# Altium footprint library Amin-Library.PcbLib: 601 footprints (part 5 of 38)
Each footprint in its own frame and in the unit in brackets; x right, y up, seen from the top. Pads: shape width x height; smd on the part's side, far side on the other; paste and mask are expansions set on the pad; w line width, h text height; cw(c..) or ccw(c..) is an arc to the next point about the centre after c.
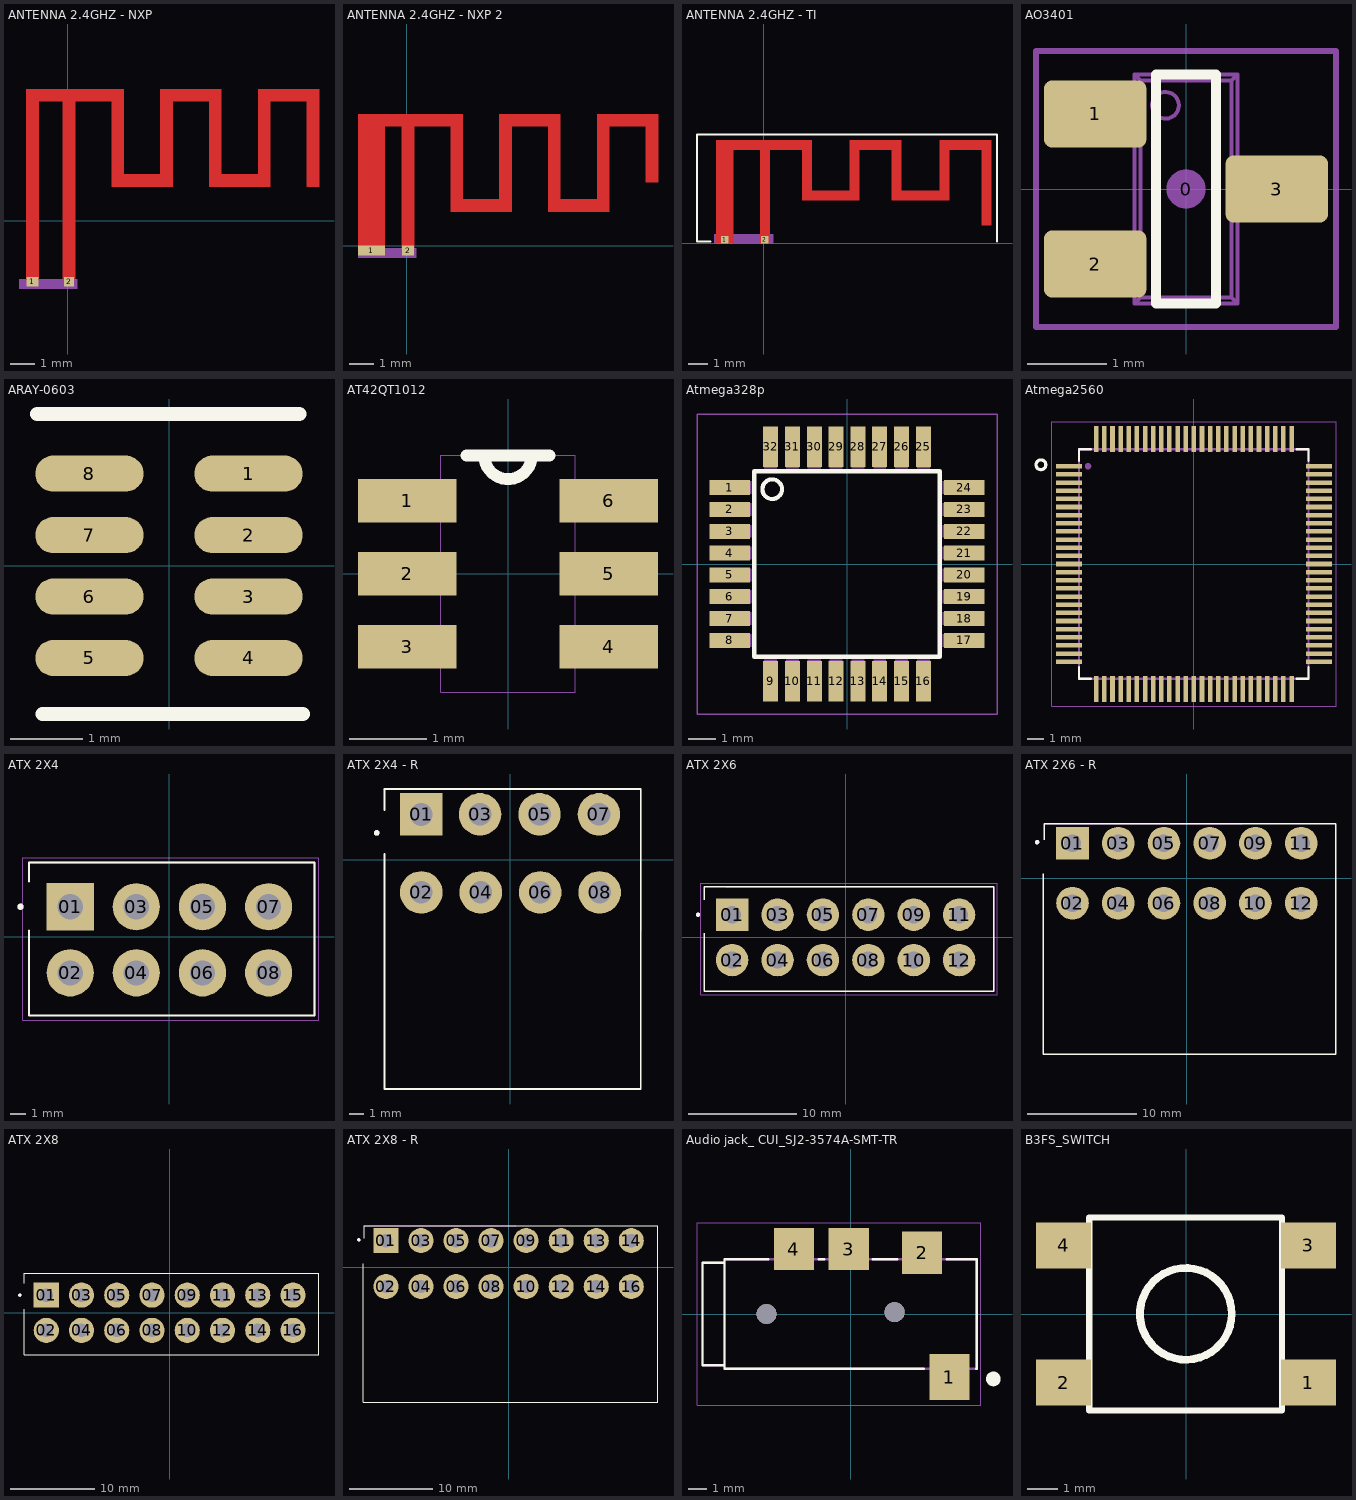
[diagram p4: the footprints below, top view; thin cyan lines are the x and y axes]

## ANTENNA 2.4GHZ - NXP [mm] "ESP32 ANTENNA"
pads (2):
  rect 0.5x0.4 smd: 1(-1.45,-2.5)
  rect 0.4x0.4 smd: 2(0.05,-2.5)
Top Layer:
  region: 0.3,-2.4 -0.2,-2.4 -0.2,4.9 -1.2,4.9 -1.2,-2.4 -1.7,-2.4 -1.7,5.4 2.3,5.4 2.3,1.9 3.8,1.9 3.8,5.4 6.3,5.4 6.3,1.9 7.8,1.9 7.8,5.4 10.3,5.4 10.3,1.4 9.8,1.4 9.8,4.9 8.3,4.9 8.3,1.4 5.8,1.4 5.8,4.9 4.3,4.9 4.3,1.4 1.8,1.4 1.8,4.9 0.3,4.9
Mechanical 3:
  rectangle: -2,-2.8 0.4,-2.4

## ANTENNA 2.4GHZ - NXP 2 [mm] "ESP32 ANTENNA"
pads (2):
  rect 1.1x0.4 smd: 1(-1.45,-0.2)
  rect 0.5x0.4 smd: 2(0.05,-0.2)
Top Layer:
  region: 0.3,-0.1 -0.2,-0.1 -0.2,4.9 -0.9,4.9 -0.9,-0.1 -2,-0.1 -2,5.4 2.3,5.4 2.3,1.9 3.8,1.9 3.8,5.4 6.3,5.4 6.3,1.9 7.8,1.9 7.8,5.4 10.3,5.4 10.3,2.6 9.8,2.6 9.8,4.9 8.3,4.9 8.3,1.4 5.8,1.4 5.8,4.9 4.3,4.9 4.3,1.4 1.8,1.4 1.8,4.9 0.3,4.9
Mechanical 3:
  rectangle: -2,-0.5 0.4,-0.1

## ANTENNA 2.4GHZ - TI [mm] "TI ANTENNA"
pads (2):
  rect 0.4x0.4 smd: 1(-2.05,0.2) 2(0.05,0.2)
Top Layer:
  region: 0.3,0 -0.2,0 -0.2,4.9 -1.6,4.9 -1.6,0 -2.5,0 -2.5,5.4 2.5,5.4 2.5,2.76 4.5,2.76 4.5,5.4 7.2,5.4 7.2,2.76 9.2,2.76 9.2,5.4 11.9,5.4 11.9,0.96 11.4,0.96 11.4,4.9 9.7,4.9 9.7,2.26 6.7,2.26 6.7,4.9 5,4.9 5,2.26 2,2.26 2,4.9 0.3,4.9
Top Overlay:
  lines w0.1: -2.8,0.1 -3.5,0.1 -3.5,5.7 -2.5,5.7 12.2,5.7 12.2,0.1
Mechanical 27:
  rectangle: -2.6,0 0.5,0.5

## AO3401 [mm] "SOT23, 3 pin"
height 1.003
pads (4):
  round 0.5 on Mech15: 0(0,0)
  rrect25% 1.3x0.85 smd: 1(-1.15,0.95) 2(-1.15,-0.95) 3(1.15,0)
Top Overlay:
  lines w0.127: -0.381,-1.45 -0.381,1.45 0.381,1.45 0.381,-1.45 -0.381,-1.45
  text "." at -2.125,0.95 h1.4
Mechanical 13:
  circle w0.05: c-0.26,1.06 r0.169
  lines w0.05: -1.19,-1.19 -1.19,-0.71 ; -1.19,0.71 -1.19,1.19 ; -1.099,-1.19 -1.099,-0.71 ; -1.099,0.71 -1.099,1.19 ; -1.074,-1.19 -1.074,-0.71 ; -1.074,0.71 -1.074,1.19 ; -0.825,-1.19 -0.825,-0.71 ; -0.825,0.71 -0.825,1.19 ; -0.65,-1.19 -1.4,-1.19 -1.4,-0.71 -0.65,-0.71 ; -0.65,0.71 -1.4,0.71 -1.4,1.19 -0.65,1.19 ; 0.65,-0.24 1.4,-0.24 1.4,0.24 0.65,0.24 ; 0.825,-0.24 0.825,0.24 ; 1.074,-0.24 1.074,0.24 ; 1.099,-0.24 1.099,0.24 ; 1.19,-0.24 1.19,0.24 ; -0.65,-1.45 0.65,-1.45 ; -0.65,-1.45 -0.65,1.45 ; -0.65,-1.45 -0.576,-1.376 ; -0.65,1.45 -0.576,1.376 ; -0.65,1.45 0.65,1.45 ; -0.576,-1.376 0.576,-1.376 ; -0.576,-1.376 -0.576,1.376 ; -0.576,1.376 0.576,1.376 ; 0.576,-1.376 0.65,-1.45 ; 0.576,-1.376 0.576,1.376 ; 0.576,1.376 0.65,1.45 ; 0.65,-1.45 0.65,1.45
Mechanical 15:
  lines w0.076: -1.9,-1.75 -1.9,1.75 1.9,1.75 1.9,-1.75 -1.9,-1.75
3D body "SOT23-3.STEP": height 1.29, standoff -0.01, extent -1.4,-1.45 1.4,1.45

## ARAY-0603 [mm]
height 1.75
pads (8):
  oval 1.5x0.5 smd: 1(1.1,1.275) 2(1.1,0.425) 3(1.1,-0.425) 4(1.1,-1.275) 5(-1.1,-1.275) 6(-1.1,-0.425) 7(-1.1,0.425) 8(-1.1,1.275)
Top Overlay:
  lines w0.2: -1.825,2.1 1.8,2.1 ; -1.75,-2.05 0.706,-2.05 1.85,-2.05

## AT42QT1012 [mil]
pads (6):
  rect 50x22 smd: 1(-51,37) 2(-51,0) 3(-51,-37) 4(51,-37) 5(51,0) 6(51,37)
Top Overlay:
  lines w6: -21,60 -12,60 ; 21,60 12,60 ; -12,60 ccw(c0,60) 12,60 ; -12,60 12,60
Mechanical 4:
  lines w0: -59,-47 -34,-47 ; -59,-47 -59,-28 ; -59,-47 -34,-47 ; -59,-47 -59,-28 ; -59,-28 -34,-28 ; -59,-28 -34,-28 ; -59,-10 -34,-10 ; -59,-10 -59,10 ; -59,-10 -34,-10 ; -59,-10 -59,10 ; -59,10 -34,10 ; -59,10 -34,10 ; -59,28 -34,28 ; -59,28 -59,47 ; -59,28 -34,28 ; -59,28 -59,47 ; -59,47 -34,47 ; -59,47 -34,47 ; -34,-60 -34,-47 ; -34,-60 34,-60 ; -34,-60 -34,-47 ; -34,-60 34,-60 ; -34,-47 -34,-28 ; -34,-47 -34,-28 ; -34,-28 -34,-10 ; -34,-28 -34,-10 ; -34,-10 -34,10 ; -34,-10 -34,10 ; -34,10 -34,28 ; -34,10 -34,28 ; -34,28 -34,47 ; -34,28 -34,47 ; -34,47 -34,60 ; -34,47 -34,60 ; -34,60 -12,60 ; -34,60 -12,60 ; -12,60 ccw(c0,60) 12,60 ; -12,60 ccw(c0,60) 12,60 ; -12,60 12,60 ; -12,60 12,60 ; 12,60 34,60 ; 12,60 34,60 ; 34,-60 34,-47 ; 34,-60 34,-47 ; 34,-47 59,-47 ; 34,-47 34,-28 ; 34,-47 59,-47 ; 34,-47 34,-28 ; 34,-28 59,-28 ; 34,-28 34,-10 ; 34,-28 59,-28 ; 34,-28 34,-10 ; 34,-10 59,-10 ; 34,-10 34,10 ; 34,-10 59,-10 ; 34,-10 34,10 ; 34,10 59,10 ; 34,10 34,28 ; 34,10 59,10 ; 34,10 34,28 ; 34,28 59,28 ; 34,28 34,47 ; 34,28 59,28 ; 34,28 34,47 ; 34,47 59,47 ; 34,47 34,60 ; 34,47 59,47 ; 34,47 34,60 ; 59,-47 59,-28 ; 59,-47 59,-28 ; 59,-10 59,10 ; 59,-10 59,10 ; 59,28 59,47 ; 59,28 59,47
3D body "User Library-SOT23-6-2.STEP": height 57.09, standoff 0, extent -55.11,-57.09 55.13,57.08

## Atmega328p [mm]
pads (32):
  rect 1.5x0.55 smd: 1(-4.3,2.8) 2(-4.3,2) 3(-4.3,1.2) 4(-4.3,0.4) 5(-4.3,-0.4) 6(-4.3,-1.2) 7(-4.3,-2) 8(-4.3,-2.8) 17(4.3,-2.8) 18(4.3,-2) 19(4.3,-1.2) 20(4.3,-0.4) 21(4.3,0.4) 22(4.3,1.2) 23(4.3,2) 24(4.3,2.8)
  rect 0.55x1.5 smd: 9(-2.8,-4.3) 10(-2,-4.3) 11(-1.2,-4.3) 12(-0.4,-4.3) 13(0.4,-4.3) 14(1.2,-4.3) 15(2,-4.3) 16(2.8,-4.3) 25(2.8,4.3) 26(2,4.3) 27(1.2,4.3) 28(0.4,4.3) 29(-0.4,4.3) 30(-1.2,4.3) 31(-2,4.3) 32(-2.8,4.3)
Top Overlay:
  circle w0.152: c-2.743,2.743 r0.359
  lines w0.152: -3.4,-3.4 3.4,-3.4 3.4,3.4 -3.4,3.4 -3.4,-3.4
Mechanical 4:
  drawing of 64 lines, arcs and shapes, not listed
Mechanical 16:
  lines w0.05: -5.5,-5.5 5.5,-5.5 5.5,5.5 -5.5,5.5 -5.5,-5.5
3D body "User Library-TQFP32-4.STEP": height 1.01, standoff -0.14, extent -4.512,-4.512 4.512,4.512

## Atmega2560 [mm]
pads (100):
  rect 1.6x0.28 smd: 1(-7.68,6) 2(-7.68,5.5) 3(-7.68,5) 4(-7.68,4.5) 5(-7.68,4) 6(-7.68,3.5) 7(-7.68,3) 8(-7.68,2.5) 9(-7.68,2) 10(-7.68,1.5) 11(-7.68,1) 12(-7.68,0.5) 13(-7.68,0) 14(-7.68,-0.5) 15(-7.68,-1) 16(-7.68,-1.5) 17(-7.68,-2) 18(-7.68,-2.5) 19(-7.68,-3) 20(-7.68,-3.5) 21(-7.68,-4) 22(-7.68,-4.5) 23(-7.68,-5) 24(-7.68,-5.5) 25(-7.68,-6) 51(7.68,-6) 52(7.68,-5.5) 53(7.68,-5) 54(7.68,-4.5) 55(7.68,-4) 56(7.68,-3.5) 57(7.68,-3) 58(7.68,-2.5) 59(7.68,-2) 60(7.68,-1.5) 61(7.68,-1) 62(7.68,-0.5) 63(7.68,0) 64(7.68,0.5) 65(7.68,1) 66(7.68,1.5) 67(7.68,2) 68(7.68,2.502) 69(7.68,3) 70(7.68,3.5) 71(7.68,4) 72(7.68,4.5) 73(7.68,5) 74(7.68,5.5) 75(7.68,6)
  rect 0.28x1.6 smd: 26(-6,-7.68) 27(-5.5,-7.68) 28(-5,-7.68) 29(-4.5,-7.68) 30(-4,-7.68) 31(-3.5,-7.68) 32(-3,-7.68) 33(-2.5,-7.68) 34(-2,-7.68) 35(-1.5,-7.68) 36(-1,-7.68) 37(-0.5,-7.68) 38(0,-7.68) 39(0.5,-7.68) 40(1,-7.68) 41(1.5,-7.68) 42(2,-7.68) 43(2.5,-7.68) 44(3,-7.68) 45(3.5,-7.68) 46(4,-7.68) 47(4.5,-7.68) 48(5,-7.68) 49(5.5,-7.68) 50(6,-7.68) 76(6,7.68) 77(5.5,7.68) 78(5,7.68) 79(4.5,7.68) 80(4,7.68) 81(3.5,7.68) 82(3,7.68) 83(2.5,7.68) 84(2,7.68) 85(1.5,7.68) 86(1,7.68) 87(0.5,7.68) 88(0,7.68) 89(-0.5,7.68) 90(-1,7.68) 91(-1.5,7.68) 92(-2,7.68) 93(-2.5,7.68) 94(-3,7.68) 95(-3.5,7.68) 96(-4,7.68) 97(-4.5,7.68) 98(-5,7.68) 99(-5.5,7.68) 100(-6,7.68)
Top Overlay:
  circle w0.2: c-9.398,6.096 r0.3
  lines w0.127: -7.05,-6.32 -7.05,-7.05 -6.32,-7.05 ; -7.05,6.32 -7.05,7.05 -6.32,7.05 ; 6.32,-7.05 7.05,-7.05 7.05,-6.32 ; 6.32,7.05 7.05,7.05 7.05,6.32
Mechanical 4:
  circle w0.2: c-6.5,6 r0.1
  circle w0.2: c-6.5,6 r0.1
  lines w0.127: -7.05,-7.05 -7.05,7.05 ; -7.05,-7.05 7.05,-7.05 ; -7.05,-7.05 -7.05,7.05 ; -7.05,-7.05 7.05,-7.05 ; -7.05,7.05 7.05,7.05 ; -7.05,7.05 7.05,7.05 ; 7.05,-7.05 7.05,7.05 ; 7.05,-7.05 7.05,7.05
Mechanical 16:
  lines w0.05: -8.73,-8.73 -8.73,8.73 8.73,8.73 8.73,-8.73 -8.73,-8.73
3D body "User Library-100A-14x14.step": height -1.65, standoff -2.75, extent -7.999,-8 8.001,8

## ATX 2X4 [mm]
pads (8):
  rect 3x3 / inner round 3 / far side rect 3x3 hole 1.6: 01(-6.3,1.9)
  round 3 hole 1.6: 02(-6.3,-2.3) 03(-2.1,1.9) 04(-2.1,-2.3) 05(2.1,1.9) 06(2.1,-2.3) 07(6.3,1.9) 08(6.3,-2.3)
Top Overlay:
  circle w0.2: c-9.45,1.9 r0.1
  lines w0.127: -8.9,0.4 -8.9,-5 9.2,-5 9.2,4.7 -8.9,4.7 -8.9,3.5
Mechanical 13:
  circle w0.2: c-9.45,1.9 r0.1
  lines w0.127: -8.9,4.7 9.2,4.7 9.2,-5
Mechanical 15:
  lines w0.05: -9.3,-5.3 9.5,-5.3 9.5,5 -9.3,5 -9.3,-5.3
3D body "ATX-M-8p.stp": height 12.6, standoff -3.3, extent -8.9,-5 9.5,5.8

## ATX 2X4 - R [mm]
pads (8):
  rect 3x3 / inner round 3 / far side rect 3x3 hole 1.6: 01(-6.3,3.2)
  round 3 hole 1.6: 02(-6.3,-2.3) 03(-2.15,3.215) 04(-2.1,-2.3) 05(2.05,3.215) 06(2.1,-2.3) 07(6.25,3.215) 08(6.3,-2.3)
Top Overlay:
  circle w0.2: c-9.45,1.9 r0.1
  lines w0.127: -8.9,0.4 -8.9,-16.185 9.2,-16.185 9.2,5 -8.9,5 -8.9,3.5
Mechanical 13:
  circle w0.2: c-9.45,1.9 r0.1
  lines w0.127: -8.9,5 9.2,5 9.2,-5
3D body "ATX-M-8p-R.stp": height 11.2, standoff -2.25, extent -9.1,-16.185 9.4,3.785

## ATX 2X6 [mm]
pads (12):
  rect 3x3 / inner round 3 / far side rect 3x3 hole 1.6: 01(-10.5,2.1)
  round 3 hole 1.6: 02(-10.5,-2.1) 03(-6.3,2.1) 04(-6.3,-2.1) 05(-2.1,2.1) 06(-2.1,-2.1) 07(2.1,2.1) 08(2.1,-2.1) 09(6.3,2.1) 10(6.3,-2.1) 11(10.5,2.1) 12(10.5,-2.1)
Top Overlay:
  circle w0.2: c-13.65,2.1 r0.1
  lines w0.127: -13.101,0.4 -13.101,-5 13.701,-5 13.701,4.7 -13.101,4.7 -13.101,3.5
Mechanical 13:
  circle w0.2: c-13.65,2.1 r0.1
  lines w0.127: -11,4.7 13.701,4.7 13.701,-5
Mechanical 15:
  lines w0.05: -13.4,-5.3 14,-5.3 14,5 -13.4,5 -13.4,-5.3
3D body "ATX-M-12p.stp": height 12.6, standoff -3.3, extent -13.101,-4.8 13.701,6

## ATX 2X6 - R [mm]
pads (12):
  rect 3x3 / inner round 3 / far side rect 3x3 hole 1.6: 01(-10.5,3.2)
  round 3 hole 1.6: 02(-10.5,-2.3) 03(-6.3,3.2) 04(-6.3,-2.3) 05(-2.1,3.2) 06(-2.1,-2.3) 07(2.1,3.2) 08(2.1,-2.3) 09(6.3,3.2) 10(6.3,-2.3) 11(10.5,3.2) 12(10.5,-2.3)
Top Overlay:
  circle w0.2: c-13.75,3.3 r0.1
  lines w0.127: -13.2,0.4 -13.2,-16.185 13.7,-16.185 13.7,5 -13.1,5 -13.1,3.5
Mechanical 13:
  circle w0.2: c-13.75,3.3 r0.1
  lines w0.127: -13.1,5 5,5
3D body "ATX-M-12p-R.stp": height 11.2, standoff -2.25, extent -13.2,-16.285 13.7,3.685

## ATX 2X8 [mm]
pads (16):
  rect 3x3 / inner round 3 / far side rect 3x3 hole 1.6: 01(-14.7,2.1)
  round 3 hole 1.6: 02(-14.7,-2.1) 03(-10.5,2.1) 04(-10.5,-2.1) 05(-6.3,2.1) 06(-6.3,-2.1) 07(-2.1,2.1) 08(-2.1,-2.1) 09(2.1,2.1) 10(2.1,-2.1) 11(6.3,2.1) 12(6.3,-2.1) 13(10.5,2.1) 14(10.5,-2.1) 15(14.7,2.1) 16(14.7,-2.1)
Top Overlay:
  circle w0.2: c-17.85,2.1 r0.1
  lines w0.127: -17.301,0.4 -17.301,-5 17.8,-5 17.8,4.7 -17.301,4.7 -17.301,3.5
Mechanical 13:
  circle w0.2: c-17.85,2.1 r0.1
3D body "ATX-M-16p.stp": height 12.6, standoff -3.3, extent -17.4,-4.8 17.8,6

## ATX 2X8 - R [mm]
pads (16):
  rect 3x3 / inner round 3 / far side rect 3x3 hole 1.6: 01(-14.7,3.2)
  round 3 hole 1.6: 02(-14.7,-2.3) 03(-10.5,3.2) 04(-10.5,-2.3) 05(-6.3,3.2) 06(-6.3,-2.3) 07(-2.1,3.2) 08(-2.1,-2.3) 09(2.1,3.2) 10(2.1,-2.3) 11(6.3,3.2) 12(6.3,-2.3) 13(10.5,3.2) 14(10.5,-2.3) 14(14.7,3.2) 16(14.7,-2.3)
Top Overlay:
  circle w0.2: c-17.95,3.3 r0.1
  lines w0.127: -17.4,0.4 -17.4,-16.185 17.9,-16.185 17.9,5 -17.3,5 -17.3,3.5
Mechanical 13:
  circle w0.2: c-17.95,3.3 r0.1
  lines w0.127: -17.3,5 0.8,5
3D body "ATX-M-16p-R.stp": height 11.2, standoff -2.25, extent -17.4,-16.085 17.9,3.885

## Audio jack_ CUI_SJ2-3574A-SMT-TR [mm]
pads (6):
  rect 2.2x2.5 smd: 1(5.4,-3.45)
  rect 2.2x2.3 smd: 2(3.9,3.35) 3(-0.1,3.55) 4(-3.1,3.55)
  round 1.1 hole 1.1 unplated: ""(-4.6,0) ""(2.4,0.1)
Top Overlay:
  circle w0.4: c7.8,-3.55 r0.2
  lines w0.127: -6.9,2.8 -8.1,2.8 -8.1,-2.8 -6.9,-2.8 ; -4.5,3 -6.9,3 -6.9,-2.8 ; -1.75,3 -1.45,3 ; 1.2,3 2.55,3 ; 4,-3 -6.9,-3 -6.9,-2.8 ; 5.25,3 6.9,3 6.9,-3 6.85,-3
Mechanical 13:
  lines w0.127: -6.9,-2.8 -8.1,-2.8 -8.1,2.8 -6.9,2.8 ; -6.9,-2.8 -6.9,2.8 ; -6.9,-2.8 -6.9,-3 6.9,-3 6.9,3 -6.9,3 -6.9,2.8
Mechanical 15:
  lines w0.05: -8.4,-5 -8.4,5 7.1,5 7.1,-5 -8.4,-5
3D body "CUI_DEVICES_SJ2-3574A-SMT-TR.step": height 5.31, standoff -0.49, extent -8.008,-4.191 6.992,4.209

## B3FS_SWITCH [mm]
height 1.35
pads (4):
  rect 1.8x1.5 smd: 1(3.998,-2.244) 2(-4.012,-2.244) 3(3.998,2.246) 4(-4.012,2.246)
Top Overlay:
  circle w0.254: c-0.012,0.006 r1.5
  lines w0.2: -3.172,-3.154 -3.172,3.156 3.138,3.156 3.138,-3.154 -3.172,-3.154
3D body: height 4.57, standoff 0, extent -1.511,-1.494 1.488,1.505
3D body: height 0.76, standoff 0, extent -4.572,1.778 -2.794,2.667
3D body: height 0.76, standoff 0, extent 2.794,-2.667 4.572,-1.778
3D body: height 0.76, standoff 0, extent 2.794,1.778 4.572,2.667
3D body: height 0.76, standoff 0, extent -4.572,-2.667 -2.794,-1.778
3D body: height 2.5, standoff 0, extent -3.171,-3.154 3.138,3.155